# Altium footprint library LimeMicroAltiumLib.PcbLib: 876 footprints (part 6 of 57)
Each footprint in its own frame and in the unit in brackets; x right, y up, seen from the top. Pads: shape width x height; smd on the part's side, far side on the other; paste and mask are expansions set on the pad; w line width, h text height; cw(c..) or ccw(c..) is an arc to the next point about the centre after c.
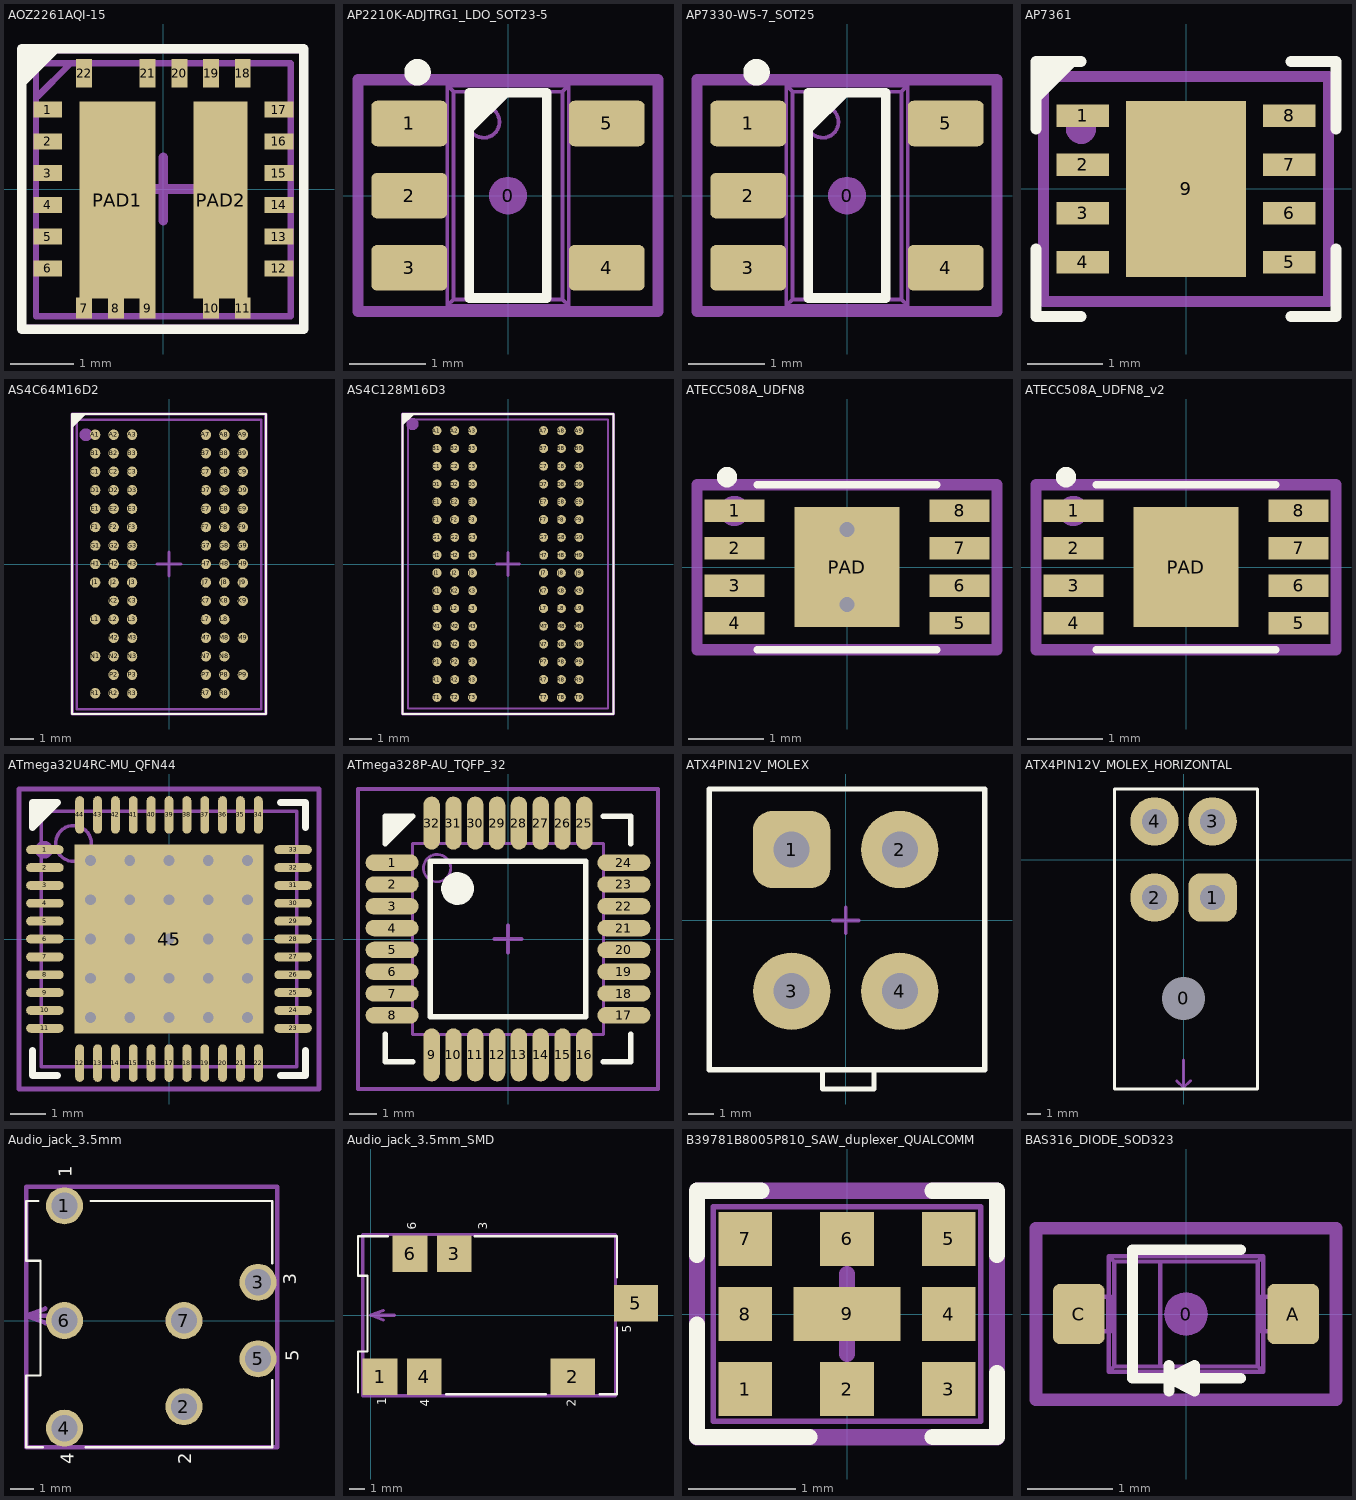
[diagram p5: the footprints below, top view; thin cyan lines are the x and y axes]

## AOZ2261AQI-15 [mm]
height 4.5
pads (24):
  rect 0.45x0.25 smd mask+0.05: 1(-1.82,1.25) 2(-1.82,0.75) 3(-1.82,0.25) 4(-1.82,-0.25) 5(-1.82,-0.75) 6(-1.82,-1.25) 12(1.82,-1.25) 13(1.82,-0.75) 14(1.82,-0.25) 15(1.82,0.25) 16(1.82,0.75) 17(1.82,1.25)
  rect 0.25x0.33 smd mask+0.05: 7(-1.25,-1.875) 8(-0.75,-1.875) 9(-0.25,-1.875) 10(0.75,-1.875) 11(1.25,-1.875)
  rect 0.25x0.45 smd mask+0.05: 18(1.25,1.82) 19(0.75,1.82) 20(0.25,1.82) 21(-0.25,1.82) 22(-1.25,1.82)
  rect 1.2x3.1 smd mask+0.05: PAD1(-0.725,-0.175)
  rect 0.85x3.1 smd mask+0.05: PAD2(0.9,-0.175)
Top Overlay:
  region: -2.255,2.205 -2.23,2.18 -2.23,1.58 -1.63,2.18
  lines w0.15: -2.235,-2.21 -2.235,2.21 2.21,2.21 2.21,-2.21 -2.235,-2.21
Mechanical 13:
  lines w0.1: -1.983,1.457 -1.483,1.957 ; -2.007,-2.007 -2.007,1.981 2.007,1.981 2.007,-2.007 -2.007,-2.007
Mechanical 15:
  circle w0.127: c-1.82,1.25 r0.051
  lines w0.1: -2.235,-2.184 2.21,-2.184 2.21,2.184 -2.235,2.184 -2.235,-2.184
  lines w0.15: -0.5,0 0.5,0 ; 0,-0.5 0,0.5
  text ".Designator" at 0,0 h0.55
3D body "AOZ2261AQI-15.stp": height 0.86, standoff -0.04, extent -2,-2 2,2

## AP2210K-ADJTRG1_LDO_SOT23-5 [mm]
pads (6):
  round 0.5 on Mech15: 0(0,0)
  rrect25% 1x0.6 smd: 1(-1.3,0.95) 2(-1.3,0) 3(-1.3,-0.95) 4(1.3,-0.95) 5(1.3,0.95)
Top Overlay:
  circle w0.2: c-1.191,1.625 r0.075
  region: -0.508,1.353 0.053,1.353 -0.508,0.792
  lines w0.127: -0.508,-1.347 0.508,-1.347 0.508,1.353 -0.508,1.353 -0.508,-1.347
Mechanical 13:
  circle w0.05: c-0.32,0.97 r0.208
  lines w0.05: -1.191,-1.15 -1.191,-0.75 ; -1.191,-0.2 -1.191,0.2 ; -1.191,0.75 -1.191,1.15 ; -1.1,-1.15 -1.1,-0.75 ; -1.1,-0.2 -1.1,0.2 ; -1.1,0.75 -1.1,1.15 ; -1.094,-1.15 -1.094,-0.75 ; -1.094,-0.2 -1.094,0.2 ; -1.094,0.75 -1.094,1.15 ; -0.844,-1.15 -0.844,-0.75 ; -0.844,-0.2 -0.844,0.2 ; -0.844,0.75 -0.844,1.15 ; -0.8,-1.15 -1.4,-1.15 -1.4,-0.75 -0.8,-0.75 ; -0.8,-0.2 -1.4,-0.2 -1.4,0.2 -0.8,0.2 ; -0.8,0.75 -1.4,0.75 -1.4,1.15 -0.8,1.15 ; 0.8,-1.15 1.4,-1.15 1.4,-0.75 0.8,-0.75 ; 0.8,0.75 1.4,0.75 1.4,1.15 0.8,1.15 ; 0.844,-1.15 0.844,-0.75 ; 0.844,0.75 0.844,1.15 ; 1.094,-1.15 1.094,-0.75 ; 1.094,0.75 1.094,1.15 ; 1.1,-1.15 1.1,-0.75 ; 1.1,0.75 1.1,1.15 ; 1.191,-1.15 1.191,-0.75 ; 1.191,0.75 1.191,1.15 ; -0.8,-1.45 0.8,-1.45 ; -0.8,-1.45 -0.719,-1.369 ; -0.8,-1.45 -0.8,1.45 ; -0.8,1.45 0.8,1.45 ; -0.8,1.45 -0.719,1.369 ; -0.719,-1.369 -0.719,1.369 ; -0.719,-1.369 0.719,-1.369 ; -0.719,1.369 0.719,1.369 ; 0.719,-1.369 0.719,1.369 ; 0.719,-1.369 0.8,-1.45 ; 0.719,1.369 0.8,1.45 ; 0.8,-1.45 0.8,1.45
Mechanical 15:
  circle w0.35: c-1.3,0.875 r0.025
  lines w0.15: -1.975,-1.525 1.975,-1.525 1.975,1.525 -1.975,1.525 -1.975,-1.525
  text ".Designator" at 0,0 h0.55
3D body "User Library-SOT-25.step": height 1.19, standoff -0.01, extent -1.4,-1.45 1.4,1.45

## AP7330-W5-7_SOT25 [mm]
height 1.6
pads (6):
  round 0.5 on Mech15: 0(0,0)
  rrect25% 1x0.6 smd: 1(-1.3,0.95) 2(-1.3,0) 3(-1.3,-0.95) 4(1.3,-0.95) 5(1.3,0.95)
Top Overlay:
  circle w0.2: c-1.191,1.625 r0.075
  region: -0.508,1.353 0.053,1.353 -0.508,0.792
  lines w0.127: -0.508,-1.347 -0.508,1.353 0.508,1.353 0.508,-1.347 -0.508,-1.347
Mechanical 13:
  circle w0.05: c-0.32,0.97 r0.208
  lines w0.05: -1.191,-1.15 -1.191,-0.75 ; -1.191,-0.2 -1.191,0.2 ; -1.191,0.75 -1.191,1.15 ; -1.1,-1.15 -1.1,-0.75 ; -1.1,-0.2 -1.1,0.2 ; -1.1,0.75 -1.1,1.15 ; -1.094,-1.15 -1.094,-0.75 ; -1.094,-0.2 -1.094,0.2 ; -1.094,0.75 -1.094,1.15 ; -0.844,-1.15 -0.844,-0.75 ; -0.844,-0.2 -0.844,0.2 ; -0.844,0.75 -0.844,1.15 ; -0.8,-1.15 -1.4,-1.15 -1.4,-0.75 -0.8,-0.75 ; -0.8,-0.2 -1.4,-0.2 -1.4,0.2 -0.8,0.2 ; -0.8,0.75 -1.4,0.75 -1.4,1.15 -0.8,1.15 ; 0.8,-1.15 1.4,-1.15 1.4,-0.75 0.8,-0.75 ; 0.8,0.75 1.4,0.75 1.4,1.15 0.8,1.15 ; 0.844,-1.15 0.844,-0.75 ; 0.844,0.75 0.844,1.15 ; 1.094,-1.15 1.094,-0.75 ; 1.094,0.75 1.094,1.15 ; 1.1,-1.15 1.1,-0.75 ; 1.1,0.75 1.1,1.15 ; 1.191,-1.15 1.191,-0.75 ; 1.191,0.75 1.191,1.15 ; -0.8,-1.45 -0.8,1.45 ; -0.8,-1.45 -0.719,-1.369 ; -0.8,-1.45 0.8,-1.45 ; -0.8,1.45 -0.719,1.369 ; -0.8,1.45 0.8,1.45 ; -0.719,-1.369 0.719,-1.369 ; -0.719,-1.369 -0.719,1.369 ; -0.719,1.369 0.719,1.369 ; 0.719,-1.369 0.8,-1.45 ; 0.719,-1.369 0.719,1.369 ; 0.719,1.369 0.8,1.45 ; 0.8,-1.45 0.8,1.45
Mechanical 15:
  circle w0.35: c-1.3,0.875 r0.025
  lines w0.15: -1.975,-1.525 -1.975,1.525 1.975,1.525 1.975,-1.525 -1.975,-1.525
  text ".Designator" at 0,0 h0.55
3D body "User Library-SOT-25.step": height 1.19, standoff -0.01, extent -1.4,-1.45 1.4,1.45

## AP7361 [mm] "Low noise LDO"
height 0.63
pads (9):
  rect 0.7x0.3 smd mask+0.05: 1(-1.375,0.975) 2(-1.375,0.325) 3(-1.375,-0.325) 4(-1.375,-0.975) 5(1.375,-0.975) 6(1.375,-0.325) 7(1.375,0.325) 8(1.375,0.975)
  rect 1.6x2.35 smd mask+0.05: 9(0,0)
Top Overlay:
  region: -1.425,1.7 -2,1.125 -2,1.7
  lines w0.15: -2,-0.8 -2,-1.7 -1.4,-1.7 ; -2,0.8 -2,1.7 -1.4,1.7 ; 1.4,-1.7 2,-1.7 2,-0.8 ; 1.4,1.7 2,1.7 2,0.8
Mechanical 15:
  circle w0.2: c-1.4,0.8 r0.1
  lines w0.15: -0.4,0 0,0 ; 0,-0.4 0,0 ; 0,0.4 0,0 ; 0.4,0 0,0 ; -1.9,-1.5 1.9,-1.5 1.9,1.5 -1.9,1.5 -1.9,-1.5
  text ".Designator" at 0,0 h0.55
3D body "User Library-DFN8_3x3mm__65mm.step": height 0.8, standoff 0, extent -1.52,-1.5 1.5,1.5

## AS4C64M16D2 [mm]
height 1.2
pads (84):
  round 0.45 smd: A1(-3.2,5.6) A2(-2.4,5.6) A3(-1.6,5.6) A7(1.6,5.6) A8(2.4,5.6) A9(3.2,5.6) B1(-3.2,4.8) B2(-2.4,4.8) B3(-1.6,4.8) B7(1.6,4.8) B8(2.4,4.8) B9(3.2,4.8) C1(-3.2,4) C2(-2.4,4) C3(-1.6,4) C7(1.6,4) C8(2.4,4) C9(3.2,4) D1(-3.2,3.2) D2(-2.4,3.2) D3(-1.6,3.2) D7(1.6,3.2) D8(2.4,3.2) D9(3.2,3.2) E1(-3.2,2.4) E2(-2.4,2.4) E3(-1.6,2.4) E7(1.6,2.4) E8(2.4,2.4) E9(3.2,2.4) F1(-3.2,1.6) F2(-2.4,1.6) F3(-1.6,1.6) F7(1.6,1.6) F8(2.4,1.6) F9(3.2,1.6) G1(-3.2,0.8) G2(-2.4,0.8) G3(-1.6,0.8) G7(1.6,0.8) G8(2.4,0.8) G9(3.2,0.8) H1(-3.2,0) H2(-2.4,0) H3(-1.6,0) H7(1.6,0) H8(2.4,0) H9(3.2,0) J1(-3.2,-0.8) J2(-2.4,-0.8) J3(-1.6,-0.8) J7(1.6,-0.8) J8(2.4,-0.8) J9(3.2,-0.8) K2(-2.4,-1.6) K3(-1.6,-1.6) K7(1.6,-1.6) K8(2.4,-1.6) K9(3.2,-1.6) L1(-3.2,-2.4) L2(-2.4,-2.4) L3(-1.6,-2.4) L7(1.6,-2.4) L8(2.4,-2.4) M2(-2.4,-3.2) M3(-1.6,-3.2) M7(1.6,-3.2) M8(2.4,-3.2) M9(3.2,-3.2) N1(-3.2,-4) N2(-2.4,-4) N3(-1.6,-4) N7(1.6,-4) N8(2.4,-4) P2(-2.4,-4.8) P3(-1.6,-4.8) P7(1.6,-4.8) P8(2.4,-4.8) P9(3.2,-4.8) R1(-3.2,-5.6) R2(-2.4,-5.6) R3(-1.6,-5.6) R7(1.6,-5.6) R8(2.4,-5.6)
Top Overlay:
  region: -4.2,5.9 -4.2,6.5 -3.6,6.5
  lines w0.1: -4.2,-6.5 4.2,-6.5 4.2,6.5 -4.2,6.5 -4.2,-6.5
Mechanical 13:
  lines w0.1: -4,-6.3 -4,6.25 4,6.25 4,-6.3 -4,-6.3
Mechanical 15:
  circle w0.35: c-3.6,5.6 r0.1
  lines w0.15: -0.5,0 0.5,0 ; 0,-0.5 0,0.5 ; -4.2,-6.5 -4.2,6.5 4.2,6.5 4.2,-6.5 -4.2,-6.5
  text ".Designator" at 0,0 h0.55
3D body: height 1.2, standoff 0, extent -4,-6.25 4,6.25
3D body: height 1.25, standoff 0, extent -3.6,5.2 -2.8,6

## AS4C128M16D3 [mm]
height 1.2
pads (96):
  round 0.41 smd: A1(-3.2,6) A2(-2.4,6) A3(-1.6,6) A7(1.6,6) A8(2.4,6) A9(3.2,6) B1(-3.2,5.2) B2(-2.4,5.2) B3(-1.6,5.2) B7(1.6,5.2) B8(2.4,5.2) B9(3.2,5.2) C1(-3.2,4.4) C2(-2.4,4.4) C3(-1.6,4.4) C7(1.6,4.4) C8(2.4,4.4) C9(3.2,4.4) D1(-3.2,3.6) D2(-2.4,3.6) D3(-1.6,3.6) D7(1.6,3.6) D8(2.4,3.6) D9(3.2,3.6) E1(-3.2,2.8) E2(-2.4,2.8) E3(-1.6,2.8) E7(1.6,2.8) E8(2.4,2.8) E9(3.2,2.8) F1(-3.2,2) F2(-2.4,2) F3(-1.6,2) F7(1.6,2) F8(2.4,2) F9(3.2,2) G1(-3.2,1.2) G2(-2.4,1.2) G3(-1.6,1.2) G7(1.6,1.2) G8(2.4,1.2) G9(3.2,1.2) H1(-3.2,0.4) H2(-2.4,0.4) H3(-1.6,0.4) H7(1.6,0.4) H8(2.4,0.4) H9(3.2,0.4) J1(-3.2,-0.4) J2(-2.4,-0.4) J3(-1.6,-0.4) J7(1.6,-0.4) J8(2.4,-0.4) J9(3.2,-0.4) K1(-3.2,-1.2) K2(-2.4,-1.2) K3(-1.6,-1.2) K7(1.6,-1.2) K8(2.4,-1.2) K9(3.2,-1.2) L1(-3.2,-2) L2(-2.4,-2) L3(-1.6,-2) L7(1.6,-2) L8(2.4,-2) L9(3.2,-2) M1(-3.2,-2.8) M2(-2.4,-2.8) M3(-1.6,-2.8) M7(1.6,-2.8) M8(2.4,-2.8) M9(3.2,-2.8) N1(-3.2,-3.6) N2(-2.4,-3.6) N3(-1.6,-3.6) N7(1.6,-3.6) N8(2.4,-3.6) N9(3.2,-3.6) P1(-3.2,-4.4) P2(-2.4,-4.4) P3(-1.6,-4.4) P7(1.6,-4.4) P8(2.4,-4.4) P9(3.2,-4.4) R1(-3.2,-5.2) R2(-2.4,-5.2) R3(-1.6,-5.2) R7(1.6,-5.2) R8(2.4,-5.2) R9(3.2,-5.2) T1(-3.2,-6) T2(-2.4,-6) T3(-1.6,-6) T7(1.6,-6) T8(2.4,-6) T9(3.2,-6)
Top Overlay:
  region: -4.75,6.75 -4.75,6.225 -4.225,6.75
  lines w0.1: -4.75,-6.75 -4.75,6.75 4.75,6.75 4.75,-6.75 -4.75,-6.75
Mechanical 13:
  lines w0.1: -4.5,-6.5 4.5,-6.5 4.5,6.5 -4.5,6.5 -4.5,-6.5
Mechanical 15:
  circle w0.35: c-4.3,6.3 r0.1
  lines w0.15: -0.5,0 0.5,0 ; 0,-0.5 0,0.5 ; -4.75,-6.75 4.75,-6.75 4.75,6.75 -4.75,6.75 -4.75,-6.75
  text ".Designator" at 0,0 h0.55
3D body: height 1.25, standoff 0, extent -4.125,5.25 -3.325,6.05
3D body: height 1.2, standoff 0.25, extent -4.5,-6.5 4.5,6.5

## ATECC508A_UDFN8 [mm]
pads (9):
  rect 0.8x0.3 smd mask+0.05: 1(-1.5,0.75) 2(-1.5,0.25) 3(-1.5,-0.25) 4(-1.5,-0.75) 5(1.5,-0.75) 6(1.5,-0.25) 7(1.5,0.25) 8(1.5,0.75)
  rect 1.4x1.6 smd mask+0.05: PAD(0,0)
via 0,-0.5 diameter 0.4 hole 0.2
via 0,0.5 diameter 0.4 hole 0.2
Top Overlay:
  circle w0.2: c-1.6,1.2 r0.035
  lines w0.1: -1.2,-1.1 1.2,-1.1 ; -1.2,1.1 1.2,1.1
Mechanical 15:
  circle w0.3: c-1.5,0.75 r0.05
  lines w0.15: -0.3,0 0.3,0 ; 0,-0.3 0,0.3 ; -2,-1.1 -2,1.1 2,1.1 2,-1.1 -2,-1.1
  text ".Designator" at 0,0 h0.55
3D body "User Library-UDFN-8_2X3_0,5.step": height 0.53, standoff 0, extent -1.5,-1 1.5,1

## ATECC508A_UDFN8_v2 [mm]
pads (9):
  rect 0.8x0.3 smd mask+0.05: 1(-1.5,0.75) 2(-1.5,0.25) 3(-1.5,-0.25) 4(-1.5,-0.75) 5(1.5,-0.75) 6(1.5,-0.25) 7(1.5,0.25) 8(1.5,0.75)
  rect 1.4x1.6 smd mask+0.05: PAD(0,0)
Top Overlay:
  circle w0.2: c-1.6,1.2 r0.035
  lines w0.1: -1.2,-1.1 1.2,-1.1 ; -1.2,1.1 1.2,1.1
Mechanical 15:
  circle w0.3: c-1.5,0.75 r0.05
  lines w0.15: -0.3,0 0.3,0 ; 0,-0.3 0,0.3 ; -2,-1.1 -2,1.1 2,1.1 2,-1.1 -2,-1.1
  text ".Designator" at 0,0 h0.55
3D body "User Library-UDFN-8_2X3_0,5.step": height 0.53, standoff 0, extent -1.5,-1 1.5,1

## ATmega32U4RC-MU_QFN44 [mm] "QFN, 44-Leads, Body 7x7mm, Pitch 0.5mm, Thermal Pad 5.3x5.3mm, IPC Low Density"
height 0.9
pads (45):
  oval 1.05x0.25 smd mask+0.05: 1(-3.475,2.5) 2(-3.475,2) 3(-3.475,1.5) 4(-3.475,1) 5(-3.475,0.5) 6(-3.475,0) 7(-3.475,-0.5) 8(-3.475,-1) 9(-3.475,-1.5) 10(-3.475,-2) 11(-3.475,-2.5) 23(3.475,-2.5) 24(3.475,-2) 25(3.475,-1.5) 26(3.475,-1) 27(3.475,-0.5) 28(3.475,0) 29(3.475,0.5) 30(3.475,1) 31(3.475,1.5) 32(3.475,2) 33(3.475,2.5)
  oval 0.25x1.05 smd mask+0.05: 12(-2.5,-3.475) 13(-2,-3.475) 14(-1.5,-3.475) 15(-1,-3.475) 16(-0.5,-3.475) 17(0,-3.475) 18(0.5,-3.475) 19(1,-3.475) 20(1.5,-3.475) 21(2,-3.475) 22(2.5,-3.475) 34(2.5,3.475) 35(2,3.475) 36(1.5,3.475) 37(1,3.475) 38(0.5,3.475) 39(0,3.475) 40(-0.5,3.475) 41(-1,3.475) 42(-1.5,3.475) 43(-2,3.475) 44(-2.5,3.475)
  rect 5.3x5.3 smd mask+0.05: 45(0,0)
via -2.2,2.2 diameter 0.6 hole 0.3
via -1.1,2.2 diameter 0.6 hole 0.3
via 0,2.2 diameter 0.6 hole 0.3
via 1.1,2.2 diameter 0.6 hole 0.3
via 2.2,2.2 diameter 0.6 hole 0.3
via -2.2,1.1 diameter 0.6 hole 0.3
via -1.1,1.1 diameter 0.6 hole 0.3
via 0,1.1 diameter 0.6 hole 0.3
via 1.1,1.1 diameter 0.6 hole 0.3
via 2.2,1.1 diameter 0.6 hole 0.3
via -2.2,0 diameter 0.6 hole 0.3
via -1.1,0 diameter 0.6 hole 0.3
via 0,0 diameter 0.6 hole 0.3
via 1.1,0 diameter 0.6 hole 0.3
via 2.2,0 diameter 0.6 hole 0.3
via -2.2,-1.1 diameter 0.6 hole 0.3
via -1.1,-1.1 diameter 0.6 hole 0.3
via 0,-1.1 diameter 0.6 hole 0.3
via 1.1,-1.1 diameter 0.6 hole 0.3
via 2.2,-1.1 diameter 0.6 hole 0.3
via -2.2,-2.2 diameter 0.6 hole 0.3
via -1.1,-2.2 diameter 0.6 hole 0.3
via 0,-2.2 diameter 0.6 hole 0.3
via 1.1,-2.2 diameter 0.6 hole 0.3
via 2.2,-2.2 diameter 0.6 hole 0.3
Top Overlay:
  region: -3.825,3.125 -3.825,3.825 -3.125,3.825
  lines w0.2: -3.825,-3.125 -3.825,-3.825 -3.125,-3.825 ; 3.125,-3.825 3.825,-3.825 3.825,-3.125 ; 3.125,3.825 3.825,3.825 3.825,3.125 ; -3.825,3.125 -3.125,3.825 -3.825,3.825 -3.825,3.125
Mechanical 13:
  circle w0.1: c-2.675,2.675 r0.5
  lines w0.1: -3.575,-3.575 -3.575,3.575 3.575,3.575 3.575,-3.575 -3.575,-3.575
Mechanical 15:
  circle w0.3: c-3.5,2.5 r0.1
  lines w0.15: -0.5,0 0.5,0 ; 0,-0.5 0,0.5 ; -4.2,-4.2 -4.2,4.2 4.2,4.2 4.2,-4.2 -4.2,-4.2
  text ".Designator" at 0,0 h0.55
3D body "User Library-QFN 44.step": height 0.8, standoff -0.05, extent -3.501,-3.501 3.501,3.501

## ATmega328P-AU_TQFP_32 [mm] "Thin QFP, 32-Leads, Body 7x7mm, Pitch 0.8mm, IPC Low Density"
height 1.2
pads (32):
  oval 1.95x0.6 smd mask+0.05: 1(-4.25,2.8) 2(-4.25,2) 3(-4.25,1.2) 4(-4.25,0.4) 5(-4.25,-0.4) 6(-4.25,-1.2) 7(-4.25,-2) 8(-4.25,-2.8) 17(4.25,-2.8) 18(4.25,-2) 19(4.25,-1.2) 20(4.25,-0.4) 21(4.25,0.4) 22(4.25,1.2) 23(4.25,2) 24(4.25,2.8)
  oval 0.6x1.95 smd mask+0.05: 9(-2.8,-4.25) 10(-2,-4.25) 11(-1.2,-4.25) 12(-0.4,-4.25) 13(0.4,-4.25) 14(1.2,-4.25) 15(2,-4.25) 16(2.8,-4.25) 25(2.8,4.25) 26(2,4.25) 27(1.2,4.25) 28(0.4,4.25) 29(-0.4,4.25) 30(-1.2,4.25) 31(-2,4.25) 32(-2.8,4.25)
Top Overlay:
  circle w0.6: c-1.85,1.85 r0.3
  region: -4.5,4.5 -3.5,4.5 -4.5,3.5
  lines w0.2: -4.5,-3.5 -4.5,-4.5 -3.5,-4.5 ; 3.5,-4.5 4.5,-4.5 4.5,-3.5 ; 3.5,4.5 4.5,4.5 4.5,3.5 ; -4.5,3.5 -4.5,4.5 -3.5,4.5 -4.5,3.5 ; -2.85,-2.85 -2.85,2.85 2.85,2.85 2.85,-2.85 -2.85,-2.85
Mechanical 13:
  circle w0.1: c-2.6,2.6 r0.5
  lines w0.1: -3.5,-3.5 -3.5,3.5 3.5,3.5 3.5,-3.5 -3.5,-3.5
Mechanical 15:
  circle w0.3: c-4.25,2.75 r0.112
  lines w0.15: -0.5,0 0.5,0 ; 0,-0.5 0,0.5 ; -5.5,-5.5 -5.5,5.5 5.5,5.5 5.5,-5.5 -5.5,-5.5
  text ".Designator" at 0,0 h0.55
3D body "User Library-TQFP32-4.step": height 1.1, standoff -0.05, extent -4.512,-4.512 4.512,4.512

## ATX4PIN12V_MOLEX [mm]
pads (4):
  rrect50% 3x3 hole 1.4: 1(-2.1,2.75)
  round 3 hole 1.4: 2(2.1,2.75) 3(-2.1,-2.75) 4(2.1,-2.75)
Top Overlay:
  lines w0.2: -0.9,-5.85 -0.9,-6.55 1.1,-6.55 1.1,-5.85 ; -5.3,-5.8 5.4,-5.8 5.4,5.1 -5.3,5.1 -5.3,-5.8
Mechanical 15:
  lines w0.15: -0.9,-5.85 -0.9,-6.55 1.1,-6.55 1.1,-5.85 ; -0.5,0 0.5,0 ; 0,-0.5 0,0.5 ; -5.3,-5.8 -5.3,5.1 5.4,5.1 5.4,-5.8 -5.3,-5.8
  text ".Designator" at 0,0.025 h0.55
3D body "039281043.stp": height 12.8, standoff -3.5, extent -5.2,-6 5.2,5

## ATX4PIN12V_MOLEX_HORIZONTAL [mm]
pads (5):
  round 3 hole 3.1: 0(0,-10.05)
  rrect50% 3.5x3.5 hole 1.8: 1(2.1,-2.75)
  round 3.5 hole 1.8: 2(-2.1,-2.75) 3(2.1,2.75) 4(-2.1,2.75)
Top Overlay:
  lines w0.2: -5,-16.6 -5,5.1 5.35,5.1 5.35,-16.6 -5,-16.6
Mechanical 15:
  lines w0.15: -5,-16.6 5.35,-16.6 5.35,5.1 -5,5.1 -5,-16.6
  lines w0.2: -0.5,-16 0,-16.5 ; 0,-14.5 0,-16.5 ; 0.5,-16 0,-16.5
  text ".Designator" at -0.1,-0.25 h0.55
  text "PCB edge" at -2,-14.5 h0.55
3D body "039301041.stp": height 11.4, standoff -3.6, extent -4.8,-16.667 5.2,3.268

## Audio_jack_3.5mm [mm]
pads (7):
  round 1.55 hole 1.1 mask+0.05: 1(2.9,4.8) 2(7.9,-3.6) 3(11,1.6) 4(2.9,-4.5) 5(11,-1.6) 6(2.9,0) 7(7.9,0)
Top Overlay:
  lines w0.1: 1.8,5 1.3,5 1.3,2.5 1.9,2.5 1.9,-2.3 1.3,-2.3 1.3,-5.3 2,-5.3 ; 3.8,-5.3 11.6,-5.3 11.6,-2.5 ; 4,5 11.6,5 11.6,2.4
  text "5" at 12.7,-1.7 h0.55
  text "4" at 3.3,-6 h0.55
  text "3" at 12.6,1.5 h0.55
  text "2" at 8.2,-6 h0.55
  text "1" at 3.2,6 h0.55
Mechanical 15:
  lines w0.2: 2.1,-0.1 1.3,0.2 ; 2.1,0.5 1.3,0.2 ; 2.8,0.2 1.3,0.2 ; 1.3,-5.3 1.3,5.6 11.8,5.6 11.8,-5.3 1.3,-5.3
  text "1" at 3.2,3.5 h0.55
  text "2" at 6.8,-3.8 h0.55
  text "3" at 9.9,1.5 h0.55
  text "4" at 3.2,-3.4 h0.55
  text "5" at 9.9,-1.7 h0.55
  text ".Designator" at 5.8,0 h0.55
  text "Board edge" at 3.6,-2.7 h0.55
3D body "SJ-43514.stp": height 5.2, standoff -2.05, extent -2.5,-5.3 11.5,4.9

## Audio_jack_3.5mm_SMD [mm]
pads (6):
  rect 2.2x2.3 smd mask+0.05: 1(0.6,-3.9) 3(5.3,3.9) 4(3.4,-3.9) 6(2.5,3.9)
  rect 2.8x2.3 smd mask+0.05: 2(12.8,-3.9) 5(16.8,0.75)
Top Overlay:
  lines w0.15: -0.8,-4.9 -0.8,-2.3 -0.2,-2.3 -0.2,2.5 -0.8,2.5 -0.8,5 1.1,5 ; 4.8,-5 11.1,-5 ; 6.6,5 15.6,5 15.6,2.4 ; 14.5,-5 15.6,-5 15.6,-0.8
  text "6" at 2.9,5.4 h0.55
  text "1" at 1,-5.7 h0.55
  text "2" at 13,-5.8 h0.55
  text "3" at 7.4,5.4 h0.55
  text "4" at 3.7,-5.8 h0.55
  text "5" at 16.5,-1.1 h0.55
Mechanical 15:
  lines w0.2: 0.8,-0.3 0,0 ; 0.8,0.3 0,0 ; 1.5,0 0,0 ; -0.5,-5.1 15.5,-5.1 15.5,5.1 -0.5,5.1 -0.5,-5.1
  text "Board edge" at 2.3,-2.7 h0.55
  text ".Designator" at 4.5,0 h0.55
  text "5" at 8.6,-1.7 h0.55
  text "4" at 1.9,-3.4 h0.55
  text "3" at 8.6,1.5 h0.55
  text "2" at 5.5,-3.8 h0.55
  text "1" at 1.9,3.5 h0.55
3D body "CUI_INC_SJ-43514-SMT-TR.step": height 5.1, standoff -0.7, extent -1.7,-4.5 15.5,4.5

## B39781B8005P810_SAW_duplexer_QUALCOMM [mm] "RF Duplexer 746MHz ~ 756MHz / 777MHz ~ 787MHz 9-SMD, No Lead"
pads (9):
  rect 0.5x0.5 smd mask+0.05: 1(-0.95,-0.7) 2(0,-0.7) 3(0.95,-0.7) 4(0.95,0) 5(0.95,0.7) 6(0,0.7) 7(-0.95,0.7) 8(-0.95,0)
  rect 1x0.5 smd mask+0.05: 9(0,0)
Top Overlay:
  lines w0.15: -1.4,-0.1 -1.4,-1.15 -0.35,-1.15 ; -1.4,0.55 -1.4,1.15 -0.8,1.15 ; 0.8,-1.15 1.4,-1.15 1.4,-0.55 ; 0.8,1.15 1.4,1.15 1.4,0.55
Mechanical 13:
  region: 0.45,0.2 0.45,-0.2 -0.45,-0.2 -0.45,0.2
  region: -0.75,0.2 -0.75,-0.2 -1.15,-0.2 -1.15,0.2
  region: -1.15,-0.5 -1.15,-0.9 -0.75,-0.9 -0.75,-0.5
  region: -0.2,-0.5 -0.2,-0.9 0.2,-0.9 0.2,-0.5
  region: 0.75,-0.5 0.75,-0.9 1.15,-0.9 1.15,-0.5
  region: 0.75,0.2 0.75,-0.2 1.15,-0.2 1.15,0.2
  region: 0.75,0.9 0.75,0.5 1.15,0.5 1.15,0.9
  region: -0.2,0.9 -0.2,0.5 0.2,0.5 0.2,0.9
  region: -1.15,0.9 -1.15,0.5 -0.75,0.5 -0.75,0.9
  lines w0.05: -1.25,-1 1.25,-1 1.25,1 -1.25,1 -1.25,-1
  text "7" at -0.675,0.6 h0.2
  text "5" at 0.525,0.6 h0.2
  text "3" at 0.525,-0.8 h0.2
  text "1" at -0.625,-0.8 h0.2
Mechanical 15:
  circle w0.2: c-0.925,-0.65 r0.035
  lines w0.15: -0.375,0 0,0 ; 0,-0.375 0,0 ; 0,0.375 0,0 ; 0.375,0 0,0 ; -1.4,-1.15 1.4,-1.15 1.4,1.15 -1.4,1.15 -1.4,-1.15
  text ".Designator" at 0,0 h0.55
3D body: height 0.9, standoff 0, extent -1.25,-1 1.25,1

## BAS316_DIODE_SOD323 [mm]
pads (3):
  round 0.508 on Mech15: 0(0,0)
  rrect25% 0.6x0.7 smd: A(1.25,0) C(-1.25,0)
Top Overlay:
  lines w0.127: -0.2,-0.9 -0.2,-0.6 ; 0.1,-0.75 -0.2,-0.75 ; 0.635,-0.75 -0.625,-0.75 -0.625,0.75 0.635,0.75 ; -0.2,-0.75 0.1,-0.9 0.1,-0.6 -0.2,-0.75
Mechanical 13:
  lines w0.05: -1.157,-0.2 -1.157,0.2 ; -1.11,-0.2 -1.11,0.2 ; -0.91,-0.2 -0.91,0.2 ; -0.9,-0.2 -0.9,-0.675 ; -0.9,0.2 -0.9,0.675 ; 0.9,-0.2 0.9,-0.675 ; 0.9,0.2 0.9,0.675 ; 0.91,-0.2 0.91,0.2 ; 1.11,-0.2 1.11,0.2 ; 1.157,-0.2 1.157,0.2 ; -0.9,-0.675 -0.838,-0.613 ; -0.9,-0.675 0.9,-0.675 ; -0.9,0.675 0.9,0.675 ; -0.9,0.675 -0.838,0.613 ; -0.838,-0.613 -0.838,0.613 ; -0.838,-0.613 -0.3,-0.613 ; -0.838,0.613 -0.3,0.613 ; -0.3,-0.613 -0.3,0.613 ; -0.3,-0.613 0.838,-0.613 ; -0.3,0.613 0.838,0.613 ; 0.838,-0.613 0.838,0.613 ; 0.838,-0.613 0.9,-0.675 ; 0.838,0.613 0.9,0.675 ; -1.3,-0.2 -1.3,0.2 -0.879,0.2 -0.879,-0.2 -1.3,-0.2 ; 0.879,-0.2 1.3,-0.2 1.3,0.2 0.879,0.2 0.879,-0.2
Mechanical 15:
  lines w0.15: -1.75,-1 -1.75,1 1.75,1 1.75,-1 -1.75,-1
  text ".Designator" at 0,0 h0.55
  text "A" at 1.05,-0.25 h0.55
  text "C" at -1.425,-0.25 h0.55
3D body "SOD323.STEP": height 1.1, standoff 0, extent -1.3,-0.675 1.3,0.675